# Altium footprint library 1.10-电容.PcbLib: 193 footprints (part 3 of 13)
Each footprint in its own frame and in the unit in brackets; x right, y up, seen from the top. Pads: shape width x height; smd on the part's side, far side on the other; paste and mask are expansions set on the pad; w line width, h text height; cw(c..) or ccw(c..) is an arc to the next point about the centre after c.
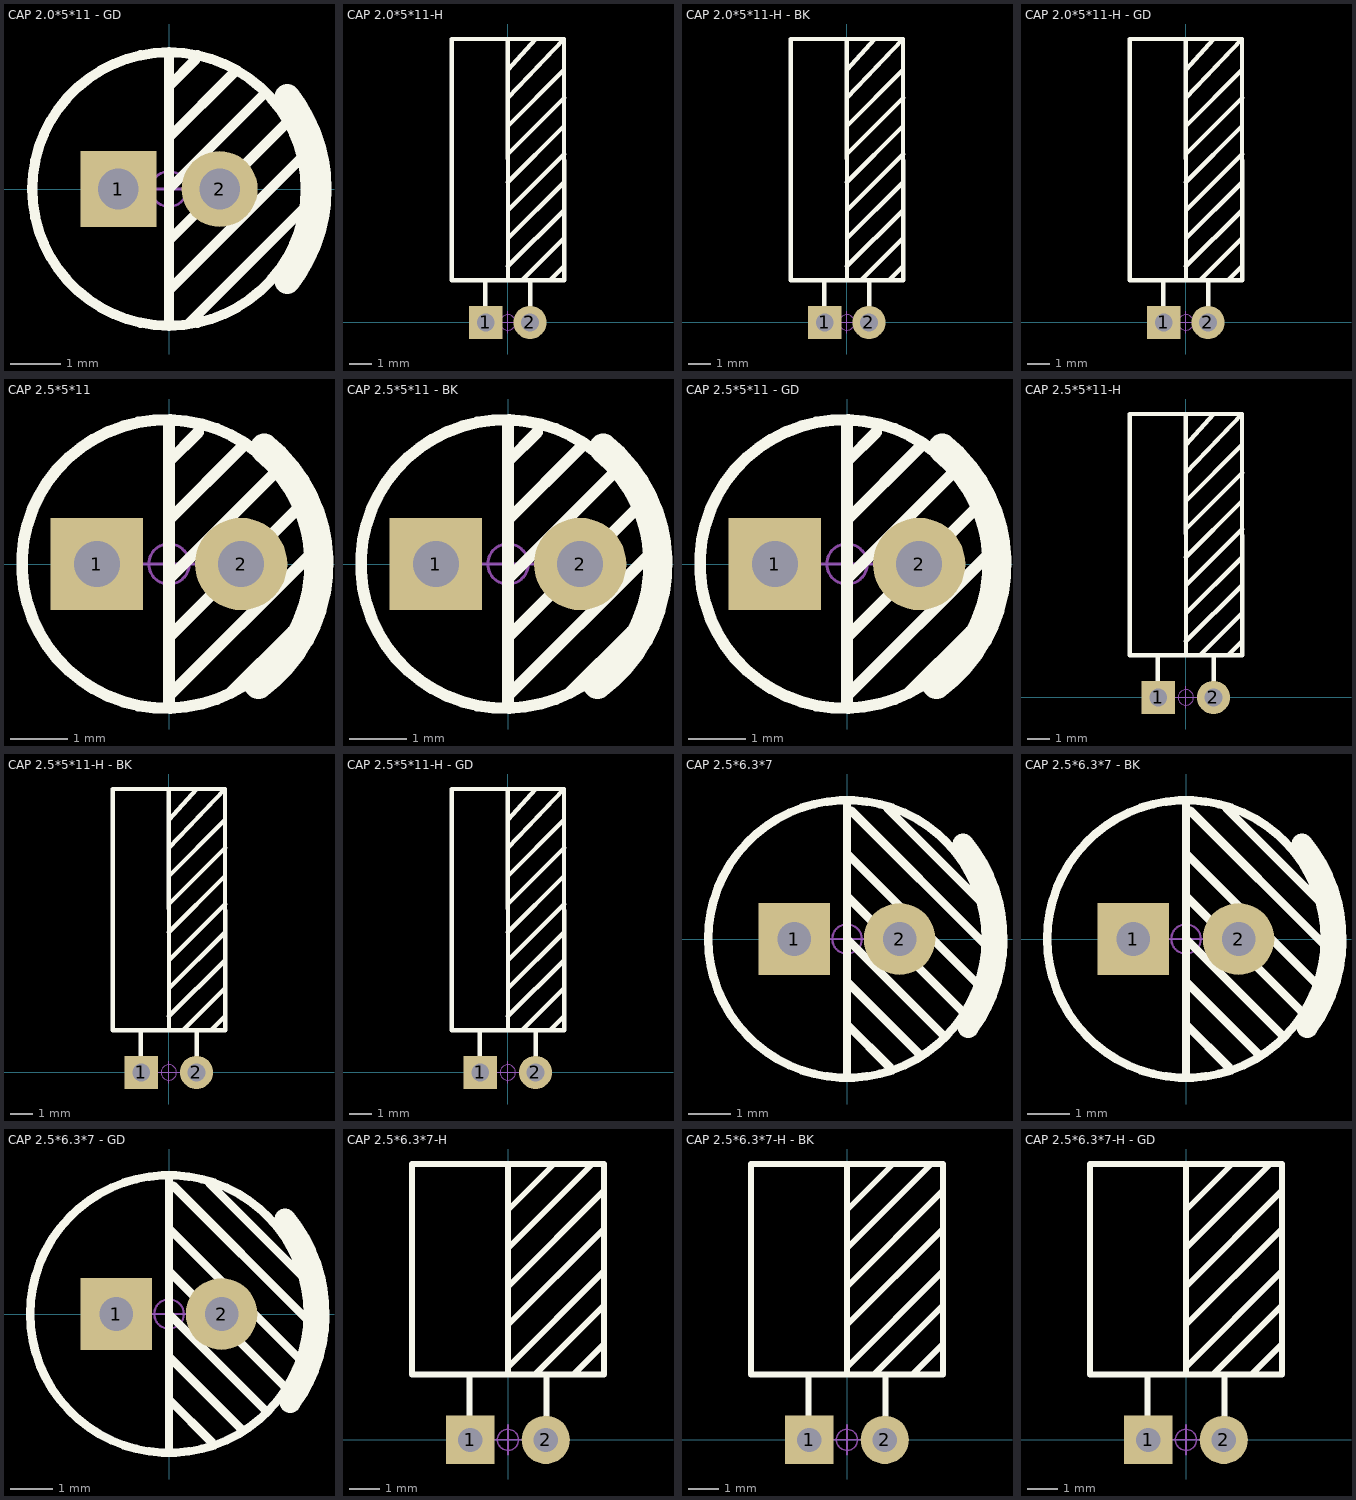
[diagram p2: the footprints below, top view; thin cyan lines are the x and y axes]

## CAP 2.0*5*11 - GD [mm] "脚距2mm直径5mm高度11mm"
pads (2):
  rect 1.5x1.5 hole 0.8: 1(-1,0)
  round 1.5 hole 0.8: 2(1,0)
Top Overlay:
  circle w0.2: c0,0 r2.7
  lines w0.2: 0,-2.667 0,-2 ; 0,-1.016 2.286,1.27 ; 0,0 1.905,1.905 ; 0,1.016 1.27,2.286 ; 0,2.032 0.508,2.54 ; 0,2.667 0,-2 ; 0.381,-2.667 2.667,-0.381 ; 2.651,0.651 0,-2
  lines w0.5: 2.338,-1.819 ccw(c0,0) 2.338,1.819
Mechanical 15:
  circle w0.05: c0,0 r0.35
  lines w0.05: -0.5,0 0.5,0 ; 0,-0.5 0,0.5
3D body "CAP 2X5X11.STEP": height 11.04, standoff -3.42, extent -2.5,-2.499 2.51,2.499

## CAP 2.0*5*11-H [mm] "脚距2mm直径5mm高度11mm"
pads (2):
  rect 1.5x1.5 hole 0.8: 1(-1,0)
  round 1.5 hole 0.8: 2(1,0)
Top Overlay:
  lines w0.2: -1.016,0.762 -1.016,1.905 ; 0,2.54 2.548,5.08 ; 0,6.35 2.54,8.89 ; 0.001,11.43 1.27,12.827 ; 0,12.827 0.006,1.905 ; 0.001,10.16 2.54,12.827 ; 0.003,7.62 2.543,10.16 ; 0.002,8.89 2.541,11.43 ; 0.004,5.08 2.545,7.62 ; 0.005,3.81 2.547,6.35 ; 0.635,1.905 2.54,3.81 ; 1.016,0.762 1.016,1.905 ; 1.905,1.905 2.54,2.54 ; 2.54,12.827 -2.54,12.827 -2.54,1.905 2.552,1.905 2.54,12.827
Mechanical 15:
  circle w0.05: c0,0 r0.35
  lines w0.05: -0.5,0 0.5,0 ; 0,-0.5 0,0.5
3D body "CAP 2X5X11-H.STEP": height 5.02, standoff -3.48, extent -2.5,-0.25 2.51,12.96

## CAP 2.0*5*11-H - BK [mm] "脚距2mm直径5mm高度11mm"
pads (2):
  rect 1.5x1.5 hole 0.8: 1(-1,0)
  round 1.5 hole 0.8: 2(1,0)
Top Overlay:
  lines w0.2: -1.016,0.762 -1.016,1.905 ; 0,2.54 2.548,5.08 ; 0,6.35 2.54,8.89 ; 0.001,11.43 1.27,12.827 ; 0,12.827 0.006,1.905 ; 0.001,10.16 2.54,12.827 ; 0.003,7.62 2.543,10.16 ; 0.002,8.89 2.541,11.43 ; 0.004,5.08 2.545,7.62 ; 0.005,3.81 2.547,6.35 ; 0.635,1.905 2.54,3.81 ; 1.016,0.762 1.016,1.905 ; 1.905,1.905 2.54,2.54 ; 2.54,12.827 2.552,1.905 -2.54,1.905 -2.54,12.827 2.54,12.827
Mechanical 15:
  circle w0.05: c0,0 r0.35
  lines w0.05: -0.5,0 0.5,0 ; 0,-0.5 0,0.5
3D body "CAP 2X5X11-H.STEP": height 5.02, standoff -3.48, extent -2.5,-0.25 2.51,12.96

## CAP 2.0*5*11-H - GD [mm] "脚距2mm直径5mm高度11mm           淘宝ID:黄晶宝石"
pads (2):
  rect 1.5x1.5 hole 0.8: 1(-1,0)
  round 1.5 hole 0.8: 2(1,0)
Top Overlay:
  lines w0.2: -1.016,0.762 -1.016,1.905 ; 0,2.54 2.548,5.08 ; 0,6.35 2.54,8.89 ; 0.001,11.43 1.27,12.827 ; 0,12.827 0.006,1.905 ; 0.001,10.16 2.54,12.827 ; 0.003,7.62 2.543,10.16 ; 0.002,8.89 2.541,11.43 ; 0.004,5.08 2.545,7.62 ; 0.005,3.81 2.547,6.35 ; 0.635,1.905 2.54,3.81 ; 1.016,0.762 1.016,1.905 ; 1.905,1.905 2.54,2.54 ; 2.54,12.827 -2.54,12.827 -2.54,1.905 2.552,1.905 2.54,12.827
Mechanical 15:
  circle w0.05: c0,0 r0.35
  lines w0.05: -0.5,0 0.5,0 ; 0,-0.5 0,0.5
3D body "CAP 2X5X11-H.STEP": height 5.02, standoff -3.48, extent -2.5,-0.25 2.51,12.96

## CAP 2.5*5*11 [mm] "脚距2.5mm直径5mm高度11mm"
pads (2):
  rect 1.6x1.6 hole 0.8: 1(-1.25,0)
  round 1.6 hole 0.8: 2(1.25,0)
Top Overlay:
  circle w0.2: c-0.05,0 r2.5
  lines w0.2: 0,-2.489 0,2.413 ; 0,-2.286 2.438,0.152 ; 0,-1.27 2.222,0.953 ; 0,-0.254 1.841,1.587 ; 0,0.762 1.27,2.032 ; 0,1.778 0.508,2.286 ; 1.079,-2.222 2.134,-1.168
  lines w0.5: 1.552,-2.086 ccw(c0,0) 1.651,2.008
Mechanical 15:
  circle w0.05: c0,0 r0.35
  lines w0.05: -0.5,0 0.5,0 ; 0,-0.5 0,0.5
3D body "CAP 2.5X5X11.STEP": height 11.03, standoff -3.43, extent -2.5,-2.499 2.51,2.499

## CAP 2.5*5*11 - BK [mm] "脚距2.5mm直径5mm高度11mm"
pads (2):
  rect 1.6x1.6 hole 0.8: 1(-1.25,0)
  round 1.6 hole 0.8: 2(1.25,0)
Top Overlay:
  circle w0.2: c-0.05,0 r2.5
  lines w0.2: 0,-2.489 0,2.413 ; 0,-2.286 2.438,0.152 ; 0,-1.27 2.222,0.953 ; 0,-0.254 1.841,1.587 ; 0,0.762 1.27,2.032 ; 0,1.778 0.508,2.286 ; 1.079,-2.222 2.134,-1.168
  lines w0.5: 1.552,-2.086 ccw(c0,0) 1.651,2.008
Mechanical 15:
  circle w0.05: c0,0 r0.35
  lines w0.05: -0.5,0 0.5,0 ; 0,-0.5 0,0.5
3D body "CAP 2.5X5X11.STEP": height 11.04, standoff -3.42, extent -2.5,-2.499 2.51,2.499

## CAP 2.5*5*11 - GD [mm] "脚距2.5mm直径5mm高度11mm"
pads (2):
  rect 1.6x1.6 hole 0.8: 1(-1.25,0)
  round 1.6 hole 0.8: 2(1.25,0)
Top Overlay:
  circle w0.2: c-0.05,0 r2.5
  lines w0.2: 0,-2.489 0,2.413 ; 0,-2.286 2.438,0.152 ; 0,-1.27 2.222,0.953 ; 0,-0.254 1.841,1.587 ; 0,0.762 1.27,2.032 ; 0,1.778 0.508,2.286 ; 1.079,-2.222 2.134,-1.168
  lines w0.5: 1.552,-2.086 ccw(c0,0) 1.651,2.008
Mechanical 15:
  circle w0.05: c0,0 r0.35
  lines w0.05: -0.5,0 0.5,0 ; 0,-0.5 0,0.5
3D body "CAP 2.5X5X11.STEP": height 11.04, standoff -3.42, extent -2.5,-2.537 2.51,2.461

## CAP 2.5*5*11-H [mm] "脚距2.5mm直径5mm高度11mm             淘宝ID:黄晶宝石"
pads (2):
  rect 1.5x1.5 hole 0.8: 1(-1.25,0)
  round 1.5 hole 0.8: 2(1.25,0)
Top Overlay:
  lines w0.2: -1.266,0.762 -1.266,1.905 ; 0,2.54 2.548,5.08 ; 0,6.35 2.54,8.89 ; 0.001,11.43 1.27,12.827 ; 0,12.827 0.006,1.905 ; 0.001,10.16 2.54,12.827 ; 0.003,7.62 2.543,10.16 ; 0.002,8.89 2.541,11.43 ; 0.004,5.08 2.545,7.62 ; 0.005,3.81 2.547,6.35 ; 0.635,1.905 2.54,3.81 ; 1.266,0.762 1.266,1.905 ; 1.905,1.905 2.54,2.54 ; 2.54,12.827 2.552,1.905 -2.54,1.905 -2.54,12.827 2.54,12.827
Mechanical 15:
  circle w0.05: c0,0 r0.35
  lines w0.05: -0.5,0 0.5,0 ; 0,-0.5 0,0.5
3D body "CAP 2.5X5X11-H.STEP": height 5.02, standoff -3.48, extent -2.5,-0.25 2.51,12.96

## CAP 2.5*5*11-H - BK [mm] "脚距2.5mm直径5mm高度11mm"
pads (2):
  rect 1.5x1.5 hole 0.8: 1(-1.25,0)
  round 1.5 hole 0.8: 2(1.25,0)
Top Overlay:
  lines w0.2: -1.266,0.762 -1.266,1.905 ; 0,2.54 2.548,5.08 ; 0,6.35 2.54,8.89 ; 0.001,11.43 1.27,12.827 ; 0,12.827 0.006,1.905 ; 0.001,10.16 2.54,12.827 ; 0.003,7.62 2.543,10.16 ; 0.002,8.89 2.541,11.43 ; 0.004,5.08 2.545,7.62 ; 0.005,3.81 2.547,6.35 ; 0.635,1.905 2.54,3.81 ; 1.266,0.762 1.266,1.905 ; 1.905,1.905 2.54,2.54 ; 2.54,12.827 2.552,1.905 -2.54,1.905 -2.54,12.827 2.54,12.827
Mechanical 15:
  circle w0.05: c0,0 r0.35
  lines w0.05: -0.5,0 0.5,0 ; 0,-0.5 0,0.5
3D body "CAP 2.5X5X11-H.STEP": height 5.02, standoff -3.48, extent -2.5,-0.25 2.51,12.96

## CAP 2.5*5*11-H - GD [mm] "脚距2.5mm直径5mm高度11mm"
pads (2):
  rect 1.5x1.5 hole 0.8: 1(-1.25,0)
  round 1.5 hole 0.8: 2(1.25,0)
Top Overlay:
  lines w0.2: -1.266,0.762 -1.266,1.905 ; 0,2.54 2.548,5.08 ; 0,6.35 2.54,8.89 ; 0.001,11.43 1.27,12.827 ; 0,12.827 0.006,1.905 ; 0.001,10.16 2.54,12.827 ; 0.003,7.62 2.543,10.16 ; 0.002,8.89 2.541,11.43 ; 0.004,5.08 2.545,7.62 ; 0.005,3.81 2.547,6.35 ; 0.635,1.905 2.54,3.81 ; 1.266,0.762 1.266,1.905 ; 1.905,1.905 2.54,2.54 ; 2.54,12.827 2.552,1.905 -2.54,1.905 -2.54,12.827 2.54,12.827
Mechanical 15:
  circle w0.05: c0,0 r0.35
  lines w0.05: -0.5,0 0.5,0 ; 0,-0.5 0,0.5
3D body "CAP 2.5X5X11-H.STEP": height 5.02, standoff -3.48, extent -2.5,-0.25 2.51,12.96

## CAP 2.5*6.3*7 [mm] "脚距2.5mm直径6.3mm高度7mm"
pads (2):
  rect 1.7x1.7 hole 0.8: 1(-1.25,0)
  round 1.7 hole 0.8: 2(1.25,0)
Top Overlay:
  circle w0.2: c0,0 r3.3
  lines w0.2: 0,-3.302 0,3.251 ; 0,-2.032 1.029,-3.061 ; 0,-1.016 1.74,-2.756 ; 0,0 2.286,-2.286 ; 0,1.016 2.743,-1.727 2.794,-1.727 ; 0,2.032 3.073,-1.041 ; 0,3.048 0.102,3.048 3.378,-0.228 3.378,-0.305 ; 0.965,3.099 3.124,0.94 3.226,0.94
  lines w0.504: 2.759,2.258 cw(c0,0) 2.883,-2.097
Mechanical 15:
  circle w0.05: c0,0 r0.35
  lines w0.05: -0.5,0 0.5,0 ; 0,-0.5 0,0.5
3D body "CAP 2.5X6.3X7.STEP": height 7.03, standoff -3.38, extent -3.15,-3.15 3.16,3.15

## CAP 2.5*6.3*7 - BK [mm] "脚距2.5mm直径6.3mm高度7mm"
pads (2):
  rect 1.7x1.7 hole 0.8: 1(-1.25,0)
  round 1.7 hole 0.8: 2(1.25,0)
Top Overlay:
  circle w0.2: c0,0 r3.3
  lines w0.2: 0,-3.302 0,3.251 ; 0,-2.032 1.029,-3.061 ; 0,-1.016 1.74,-2.756 ; 0,0 2.286,-2.286 ; 0,1.016 2.743,-1.727 2.794,-1.727 ; 0,2.032 3.073,-1.041 ; 0,3.048 0.102,3.048 3.378,-0.228 3.378,-0.305 ; 0.965,3.099 3.124,0.94 3.226,0.94
  lines w0.504: 2.759,2.258 cw(c0,0) 2.883,-2.097
Mechanical 15:
  circle w0.05: c0,0 r0.35
  lines w0.05: -0.5,0 0.5,0 ; 0,-0.5 0,0.5
3D body "CAP 2.5X6.3X7.STEP": height 7.04, standoff -3.37, extent -3.15,-3.15 3.16,3.15

## CAP 2.5*6.3*7 - GD [mm] "脚距2.5mm直径6.3mm高度7mm             淘宝ID:黄晶宝石"
pads (2):
  rect 1.7x1.7 hole 0.8: 1(-1.25,0)
  round 1.7 hole 0.8: 2(1.25,0)
Top Overlay:
  circle w0.2: c0,0 r3.3
  lines w0.2: 0,-3.302 0,3.251 ; 0,-2.032 1.029,-3.061 ; 0,-1.016 1.74,-2.756 ; 0,0 2.286,-2.286 ; 0,1.016 2.743,-1.727 2.794,-1.727 ; 0,2.032 3.073,-1.041 ; 0,3.048 0.102,3.048 3.378,-0.228 3.378,-0.305 ; 0.965,3.099 3.124,0.94 3.226,0.94
  lines w0.504: 2.759,2.258 cw(c0,0) 2.883,-2.097
Mechanical 15:
  circle w0.05: c0,0 r0.35
  lines w0.05: -0.5,0 0.5,0 ; 0,-0.5 0,0.5
3D body "CAP 2.5X6.3X7.STEP": height 7.04, standoff -3.37, extent -3.15,-3.15 3.16,3.15

## CAP 2.5*6.3*7-H [mm] "脚距2.5mm直径6.3mm高度7mm"
pads (2):
  rect 1.6x1.6 hole 0.8: 1(-1.25,0)
  round 1.6 hole 0.8: 2(1.25,0)
Top Overlay:
  lines w0.2: -1.27,0.762 -1.27,2.159 ; 0,2.159 0,9.144 ; 0,2.413 3.175,5.588 3.175,5.715 ; 0,3.81 3.175,6.985 ; 0,5.08 3.175,8.255 ; 0,6.35 2.794,9.144 ; 0,7.62 1.524,9.144 ; 0.889,2.159 3.175,4.445 ; 1.27,0.762 1.27,2.159 ; 2.159,2.159 3.175,3.175 ; -3.175,2.159 3.175,2.159 3.175,9.144 -3.175,9.144 -3.175,2.159
Mechanical 15:
  circle w0.05: c0,0 r0.35
  lines w0.05: -0.5,0 0.5,0 ; 0,-0.5 0,0.5
3D body "CAP 2.5X6.3X7-H.STEP": height 6.32, standoff -3.48, extent -3.15,-0.3 3.16,8.91

## CAP 2.5*6.3*7-H - BK [mm] "脚距2.5mm直径6.3mm高度7mm"
pads (2):
  rect 1.6x1.6 hole 0.8: 1(-1.25,0)
  round 1.6 hole 0.8: 2(1.25,0)
Top Overlay:
  lines w0.2: -1.27,0.762 -1.27,2.159 ; 0,2.159 0,9.144 ; 0,2.413 3.175,5.588 3.175,5.715 ; 0,3.81 3.175,6.985 ; 0,5.08 3.175,8.255 ; 0,6.35 2.794,9.144 ; 0,7.62 1.524,9.144 ; 0.889,2.159 3.175,4.445 ; 1.27,0.762 1.27,2.159 ; 2.159,2.159 3.175,3.175 ; -3.175,2.159 3.175,2.159 3.175,9.144 -3.175,9.144 -3.175,2.159
Mechanical 15:
  circle w0.05: c0,0 r0.35
  lines w0.05: -0.5,0 0.5,0 ; 0,-0.5 0,0.5
3D body "CAP 2.5X6.3X7-H.STEP": height 6.32, standoff -3.48, extent -3.15,-0.3 3.16,8.91

## CAP 2.5*6.3*7-H - GD [mm] "脚距2.5mm直径6.3mm高度7mm"
pads (2):
  rect 1.6x1.6 hole 0.8: 1(-1.25,0)
  round 1.6 hole 0.8: 2(1.25,0)
Top Overlay:
  lines w0.2: -1.27,0.762 -1.27,2.159 ; 0,2.159 0,9.144 ; 0,2.413 3.175,5.588 3.175,5.715 ; 0,3.81 3.175,6.985 ; 0,5.08 3.175,8.255 ; 0,6.35 2.794,9.144 ; 0,7.62 1.524,9.144 ; 0.889,2.159 3.175,4.445 ; 1.27,0.762 1.27,2.159 ; 2.159,2.159 3.175,3.175 ; -3.175,2.159 -3.175,9.144 3.175,9.144 3.175,2.159 -3.175,2.159
Mechanical 15:
  circle w0.05: c0,0 r0.35
  lines w0.05: -0.5,0 0.5,0 ; 0,-0.5 0,0.5
3D body "CAP 2.5X6.3X7-H.STEP": height 6.32, standoff -3.48, extent -3.15,-0.3 3.16,8.91